# EAGLE library part IC_BL1551 (library dp_devices.v6)
BL1551 Low Voltage SPDT Analog Switch
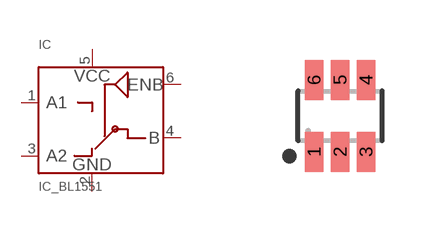
[diagram p176: symbol with the pads of SC-70-6; footprint SC-70-6]

Designator prefix IC

## IC_BL1551  [SC-70-6]
1  A1  in
2  GND  pwr
3  A2  in
4  B  out
5  VCC  pwr
6  ENB  in

## Footprint SC-70-6 (pad centres in mm)
smd 0.47 x 1: 1 -0.65,-0.9; 2 0,-0.9; 3 0.65,-0.9; 4 0.65,0.9; 5 0,0.9; 6 -0.65,0.9